# Altium footprint library FootPrintLib_0.PcbLib: 266 footprints (part 17 of 17)
Each footprint in its own frame and in the unit in brackets; x right, y up, seen from the top. Pads: shape width x height; smd on the part's side, far side on the other; paste and mask are expansions set on the pad; w line width, h text height; cw(c..) or ccw(c..) is an arc to the next point about the centre after c.
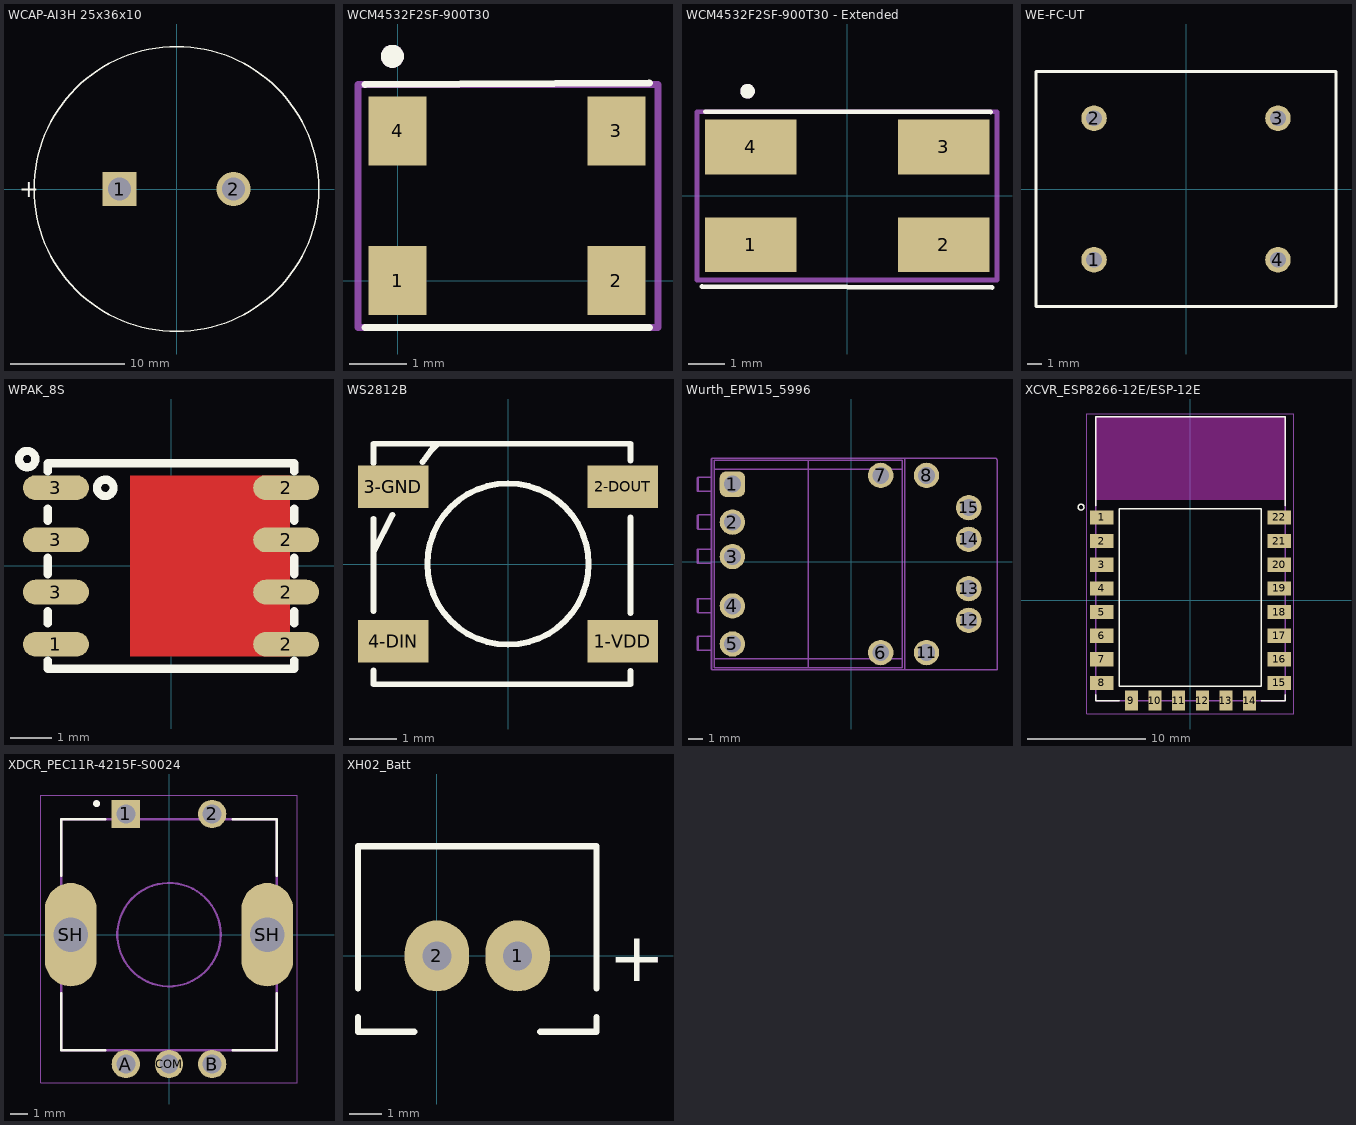
[diagram p16: the footprints below, top view; thin cyan lines are the x and y axes]

## WCAP-AI3H 25x36x10 [mm] "Polarized capacitors, Aluminum Electrolytic Capacitors, 2-Leads, Body 25x36x10"
height 36
pads (2):
  rect 3x3 hole 2: 1(-5,0)
  round 3 hole 2: 2(5,0)
Top Overlay:
  circle w0.127: c0,0 r12.5
  text "+" at -13.825,-0.737 h1.5
3D body "25x36.stp": height 36.19, standoff -5.95, extent -17.678,-17.678 17.678,17.678

## WCM4532F2SF-900T30 [mm]
pads (4):
  rect 1x1.2 smd: 1(0,0) 2(3.8,0) 3(3.8,2.6) 4(0,2.6)
Top Overlay:
  circle w0.2: c-0.09,3.893 r0.1
  lines w0.127: -0.559,-0.813 4.369,-0.813 ; -0.559,3.404 4.369,3.429
Mechanical 13:
  circle w0.2: c-0.09,3.893 r0.1
  lines w0.127: -0.686,-0.813 4.521,-0.813 4.521,3.404 -0.686,3.404 -0.686,-0.813
Mechanical 15:
  lines w0.05: -0.686,-0.813 -0.686,3.404 4.521,3.404 4.521,-0.813 -0.686,-0.813

## WCM4532F2SF-900T30 - Extended [mm]
pads (4):
  rect 2.5x1.5 smd: 1(-2.637,-1.338) 2(2.637,-1.338) 3(2.637,1.338) 4(-2.637,1.338)
Top Overlay:
  circle w0.2: c-2.727,2.86 r0.1
  lines w0.127: -3.972,-2.481 3.967,-2.506 ; -3.881,2.294 3.922,2.293
Mechanical 13:
  circle w0.2: c-2.727,2.86 r0.1
  lines w0.127: -4.11,-2.303 -4.11,2.294 4.094,2.294 4.094,-2.303 -4.11,-2.303
Mechanical 15:
  lines w0.05: -4.11,-2.303 -4.11,2.294 4.094,2.294 4.094,-2.303 -4.11,-2.303

## WE-FC-UT [mm] "THT Inductor, 4-Leads, Body 21.2 x 16.6 mm"
height 22.5
pads (4):
  round 1.8 hole 1.1: 1(-6.5,-5) 2(-6.5,5) 3(6.5,5) 4(6.5,-5)
Top Overlay:
  lines w0.2: -10.6,-8.3 -10.6,8.3 10.6,8.3 10.6,-8.3 -10.6,-8.3
Mechanical 1:
  lines w0.1: -10.6,-8.3 -10.6,8.3 10.6,8.3 10.6,-8.3 -10.6,-8.3
3D body "7448640412.stp": height 22.5, standoff -3.28, extent -10.515,-8.19 10.615,8.35

## WPAK_8S [mm] "WPAK, POWERPAK SO-8 1.27mm pitch Single"
height 1.8
pads (8):
  oval 1.6x0.6 smd: 1(-2.8,-1.905) 2(2.8,-1.905) 2(2.8,-0.635) 2(2.8,0.635) 2(2.8,1.905) 3(-2.8,-0.635) 3(-2.8,0.635) 3(-2.8,1.905)
Top Layer:
  region: -1,2.2 -1,-2.2 2.9,-2.2 2.9,2.2
Top Overlay:
  circle w0.2: c-3.5,2.6 r0.2
  circle w0.2: c-1.6,1.9 r0.2
  lines w0.2: -3,-2.3 -3,-2.5 3,-2.5 3,-2.3 ; -3,-1.4 -3,-1.1 ; -3,-0.2 -3,0.2 ; -3,1.1 -3,1.4 ; -3,2.3 -3,2.5 3,2.5 3,2.3 ; 3,-1.4 3,-1.1 ; 3,-0.2 3,0.2 ; 3,1.1 3,1.4
Top Solder:
  region: -1.1,2.3 -1.1,-2.3 2.9,-2.3 2.9,2.3
3D body "User Library-PowerPAK SO-8 (S).step": height 1.04, standoff 0, extent -3.075,-2.575 3.075,2.575

## WS2812B [mm]
pads (4):
  rect 1.5x0.9 smd: 1-VDD(2.45,-1.65) 2-DOUT(2.45,1.65) 3-GND(-2.45,1.65) 4-DIN(-2.45,-1.65)
Top Overlay:
  circle w0.127: c0,0 r1.72
  lines w0.127: -2.87,-2.272 -2.87,-2.565 2.616,-2.565 2.616,-2.286 ; -2.87,0.254 -2.87,0.965 ; -2.87,2.159 -2.87,2.565 -1.54,2.565 -1.826,2.173 ; -2.865,-1.001 -2.865,0.269 ; -2.848,0.302 -2.468,1.048 ; -1.651,2.413 -1.499,2.565 2.616,2.565 2.616,2.207 ; 2.616,-1.041 2.616,0.991
3D body "WS2812B.step": height 1.5, standoff -0.07, extent -2.801,-2.511 2.547,2.489

## Wurth_EPW15_5996 [mm]
pads (13):
  rrect50% 1.8x1.8 hole 1.2: 1(-8.441,5.518)
  round 1.8 hole 1.2: 2(-8.441,2.818) 3(-8.441,0.378) 4(-8.441,-3.132) 5(-8.441,-5.832) 6(2.089,-6.442) 7(2.089,6.138) 8(5.339,6.138) 11(5.339,-6.442) 12(8.339,-4.152) 13(8.339,-1.902) 14(8.339,1.598) 15(8.339,3.848)
Mechanical 5:
  circle w0.1: c-8.451,5.548 r0.5
  lines w0.1: -9.955,-6.292 -10.855,-6.292 ; -9.955,-5.292 -10.855,-5.292 ; -9.955,-3.602 -10.855,-3.602 ; -9.955,-2.602 -10.855,-2.602 ; -9.955,-0.102 -10.855,-0.102 ; -9.955,0.898 -10.855,0.898 ; -9.955,2.328 -10.855,2.328 ; -9.955,3.328 -10.855,3.328 ; -9.955,5.008 -10.855,5.008 ; -9.955,6.008 -10.855,6.008 ; -9.89,-7.646 cw(c-9.855,-7.552) -9.955,-7.552 ; -9.89,-7.552 -9.955,-7.552 ; -9.89,7.248 -9.955,7.248 ; -9.89,7.341 ccw(c-9.855,7.248) -9.955,7.248 ; 3.79,-7.652 10.345,-7.652 10.345,7.248 ccw(c10.245,7.248) 10.245,7.348 3.79,7.348 ; -10.855,-6.292 cw(c-10.855,-6.192) -10.955,-6.192 -10.955,-5.392 cw(c-10.855,-5.392) -10.855,-5.292 ; -10.855,-6.292 -10.855,-5.292 ; -10.855,-3.602 cw(c-10.855,-3.502) -10.955,-3.502 -10.955,-2.702 cw(c-10.855,-2.702) -10.855,-2.602 ; -10.855,-3.602 -10.855,-2.602 ; -10.855,-0.102 cw(c-10.855,-0.002) -10.955,-0.002 -10.955,0.798 cw(c-10.855,0.798) -10.855,0.898 ; -10.855,-0.102 -10.855,0.898 ; -10.855,2.328 cw(c-10.855,2.428) -10.955,2.428 -10.955,3.228 cw(c-10.855,3.228) -10.855,3.328 ; -10.855,2.328 -10.855,3.328 ; -10.855,5.008 cw(c-10.855,5.108) -10.955,5.108 -10.955,5.908 cw(c-10.855,5.908) -10.855,6.008 ; -10.855,5.008 -10.855,6.008 ; -9.955,-7.552 -9.955,7.248 ; -9.73,-6.862 -3.05,-6.862 ; -9.73,-6.862 -9.73,6.558 ; -9.73,-6.862 -9.73,-7.28 -9.73,-7.502 3.63,-7.502 3.63,-7.28 3.63,-6.862 ; -9.73,6.558 -3.05,6.558 ; -9.73,6.558 -9.73,6.975 -9.73,7.198 3.63,7.198 3.63,6.975 3.63,6.558 ; -3.05,-6.862 3.63,-6.862 ; -3.05,-6.862 -3.05,-7.502 -3.05,-6.862 ; -3.05,-6.862 -3.05,6.558 ; -3.05,-6.862 -3.05,6.558 ; -3.05,6.558 3.63,6.558 ; -3.05,6.558 -3.05,7.198 -3.05,6.558 ; 3.63,-6.862 3.63,6.558 ; -9.89,-7.662 3.79,-7.662 3.79,7.358 -9.89,7.358 -9.89,-7.662
3D body "750343910.stp": height 22.6, standoff -3, extent -10.955,-7.652 10.345,7.368
3D body: height 22.6, standoff 22.6, extent -8.95,5.048 -7.951,6.047

## XCVR_ESP8266-12E/ESP-12E [mm]
pads (22):
  rect 2x1.2 smd: 1(-7.5,7) 2(-7.5,5) 3(-7.5,3) 4(-7.5,1) 5(-7.5,-1) 6(-7.5,-3) 7(-7.5,-5) 8(-7.5,-7) 15(7.5,-7) 16(7.5,-5) 17(7.5,-3) 18(7.5,-1) 19(7.5,1) 20(7.5,3) 21(7.5,5) 22(7.5,7)
  rect 1.1x1.7 smd: 9(-5,-8.5) 10(-3,-8.5) 11(-1,-8.5) 12(1,-8.5) 13(3,-8.5) 14(5,-8.5)
Top Overlay:
  circle w0.127: c-9.25,7.875 r0.25
  lines w0.127: -8,-8 -8,-8.5 -6,-8.5 ; -8,8 -8,15.5 8,15.5 8,8 ; 6,-8.5 8,-8.5 8,-8 ; -6,-7.26 -6,7.74 6,7.74 6,-7.26 -6,-7.26
Keep-Out Layer:
  region: 8,8.51 -8.009,8.51 -8.009,15.5 8,15.5
  region: 8,8.51 -8.009,8.51 -8.009,15.5 8,15.5
Mechanical 13:
  lines w0.127: -8,-8.5 -8,15.5 8,15.5 8,-8.5 -8,-8.5
Mechanical 15:
  lines w0.05: -8.75,-9.625 -8.75,15.75 8.75,15.75 8.75,-9.625 -8.75,-9.625

## XDCR_PEC11R-4215F-S0024 [mm]
pads (7):
  rect 1.65x1.65 hole 1.1: 1(-2.5,7)
  round 1.65 hole 1.1: 2(2.5,7) A(-2.5,-7.5) B(2.5,-7.5) COM(0,-7.5)
  oval 3x6 hole 2 square: SH(-5.7,0) SH(5.7,0)
Top Overlay:
  circle w0.2: c-4.2,7.6 r0.1
  lines w0.127: -6.25,-3.4 -6.25,-6.7 -3.7,-6.7 ; -6.25,3.4 -6.25,6.7 -3.7,6.7 ; 3.7,-6.7 6.25,-6.7 6.25,-3.4 ; 3.7,6.7 6.25,6.7 6.25,3.4
Mechanical 13:
  circle w0.127: c0,0 r3
  circle w0.2: c-4.2,7.6 r0.1
  lines w0.127: -6.25,-6.7 6.25,-6.7 6.25,6.7 -6.25,6.7 -6.25,-6.7
Mechanical 15:
  lines w0.05: -7.45,-8.6 -7.45,8.1 7.45,8.1 7.45,-8.6 -7.45,-8.6
3D body "EC11 Rotary Encoder Dode Switch-15mm .STEP": height 19.5, standoff -3.65, extent -5.857,-7.725 5.856,7.225

## XH02_Batt [mm] "XH Connector, Body 2.5 x 7.4 mm"
height 7
pads (2):
  oval 2x2.2 hole 0.9: 1(2.5,0) 2(0,0)
Top Overlay:
  lines w0.2: -2.45,-1.9 -2.45,-2.35 -0.7,-2.35 ; -2.45,-1 -2.45,3.4 4.95,3.4 4.95,-1 ; 3.2,-2.35 4.925,-2.35 ; 4.95,-2.35 4.95,-1.9
  text "+" at 5.334,-0.787 h1.52
3D body "User Library-PW10-XX-M redPW10-2M.STEP": height 7, standoff -3.3, extent -2.5,-2.3 5,3.4